# Altium footprint library MFG01.PcbLib: 21 footprints (part 2 of 2)
Each footprint in its own frame and in the unit in brackets; x right, y up, seen from the top. Pads: shape width x height; smd on the part's side, far side on the other; paste and mask are expansions set on the pad; w line width, h text height; cw(c..) or ccw(c..) is an arc to the next point about the centre after c.
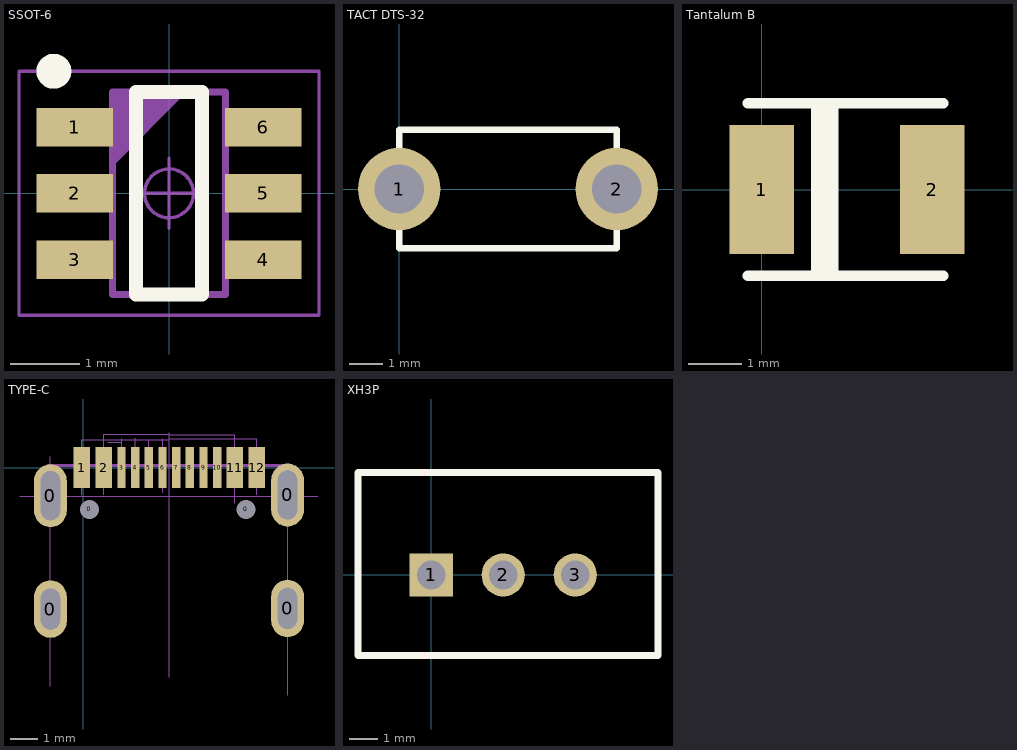
[diagram p1: the footprints below, top view; thin cyan lines are the x and y axes]

## SSOT-6 [mm] "SOT23, 0.95mm pitch; 6 pin, 1.625mm W X 2.90mm L X 1.00mm H body, IPC Medium Density"
height 1
pads (6):
  rect 1.1x0.55 smd: 1(-1.35,0.95) 2(-1.35,0) 3(-1.35,-0.95) 4(1.35,-0.95) 5(1.35,0) 6(1.35,0.95)
Top Overlay:
  circle w0.25: c-1.65,1.75 r0.125
  lines w0.2: -0.475,-1.45 -0.475,1.45 0.475,1.45 0.475,-1.45 -0.475,-1.45
Mechanical 14:
  lines w0.1: -0.812,0.45 0.188,1.45 ; -0.812,0.55 0.088,1.45 ; -0.812,0.65 -0.012,1.45 ; -0.812,0.75 -0.112,1.45 ; -0.812,0.85 -0.212,1.45 ; -0.812,0.95 -0.312,1.45 ; -0.812,1.05 -0.412,1.45 ; -0.812,1.15 -0.512,1.45 ; -0.812,1.25 -0.612,1.45 ; -0.812,1.35 -0.712,1.45 ; -0.812,-1.45 -0.812,1.45 0.812,1.45 0.812,-1.45 -0.812,-1.45
Mechanical 15:
  circle w0.05: c0,0 r0.35
  lines w0.05: -0.5,0 0.5,0 ; 0,-0.5 0,0.5 ; -2.15,-1.75 -2.15,1.75 2.15,1.75 2.15,-1.75 -2.15,-1.75
3D body "SOT95P280X100-6N.stp": height 1, standoff 0, extent -1.4,-1.5 1.4,1.5

## TACT DTS-32 [mm]
height 5
pads (2):
  round 2.5 hole 1.5: 1(0,0) 2(6.6,0)
Top Overlay:
  lines w0.2: 0,-1 0,-1.8 6.6,-1.8 6.6,-1 ; 0,1 0,1.8 6.6,1.8 6.6,1
3D body "User Library-DTS-32.STEP": height 5.5, standoff -3.01, extent -0.703,-1.75 7.053,1.75

## Tantalum B [mm]
height 1.2
pads (2):
  rect 1.2x2.4 smd: 1(0,0) 2(3.175,0)
Top Overlay:
  rectangle: 0.917,-1.6 1.425,1.625
  lines w0.2: -0.25,-1.599 3.375,-1.599 ; -0.25,1.605 3.375,1.605
3D body "User Library-CaseB_3528-21.STEP": height 1.9, standoff 0, extent -0.175,-1.425 3.325,1.375

## TYPE-C [mm] "TYPE-C"
height 3.9
pads (18):
  oval 1.2x2.1 hole 0.7 slot 1.5 at 90 deg: 0(-1.2,-5.175) 0(7.475,-5.15)
  oval 1.2x2.3 hole 0.7 slot 1.8 at 90 deg: 0(-1.2,-1.025) 0(7.475,-1)
  round 0.3 hole 0.7: 0(0.225,-1.525) 0(5.95,-1.525)
  rect 0.6x1.5 smd: 1(-0.05,0) 2(0.75,0) 11(5.55,0) 12(6.35,0)
  rect 0.3x1.5 smd: 3(1.4,0) 4(1.9,0) 5(2.4,0) 6(2.9,0) 7(3.4,0) 8(3.9,0) 9(4.4,0) 10(4.9,0)
Mechanical 8:
  lines w0.01: -2.325,-1.05 8.575,-1.05 ; -1.2,-8 -1.2,0.4 ; -0.05,-1 -0.05,1.025 3.15,1.025 ; 0.75,-1 0.75,1.225 3.15,1.225 ; 0.9,0.925 1.4,0.925 ; 1.4,0.75 1.4,1.05 ; 1.9,0.75 1.9,1.075 ; 2.4,0.675 2.4,1.025 ; 2.9,-0.925 2.9,1.05 ; 3.15,-7.675 3.15,1.275 ; 3.15,1.05 6.35,1.05 6.35,-1 ; 3.15,1.2 5.55,1.2 5.55,-1.3 ; 7.475,-8.325 7.475,0.075
  lines w0.1: -1.6,-1.35 -1.6,-0.65 ; -1.4,-5.675 -1.4,-4.975 ; -1.4,-1.35 -1.15,-1.35 ; -1.4,-1 -1.15,-1 ; -1.4,-0.65 -1.15,-0.65 ; -1.2,-5.675 -0.95,-5.675 -0.95,-5.925 ; -1.2,-5.325 -0.95,-5.325 ; -1.2,-4.975 -0.95,-4.975 -0.95,-4.725 ; -1.15,-1.6 -1.15,-1.35 ; -1.15,-1.25 -1.15,-1 ; -1.15,-0.75 -1.15,-1 ; -1.15,-0.4 -1.15,-0.65 ; -0.95,-5.575 -0.95,-5.325 ; -0.95,-5.075 -0.95,-5.325 ; -0.9,-1.35 -1.15,-1.35 ; -0.9,-1 -1.15,-1 ; -0.9,-0.65 -1.15,-0.65 ; 7.025,-5.75 7.275,-5.75 ; 7.025,-5.4 7.275,-5.4 ; 7.025,-5.05 7.275,-5.05 ; 7.075,-1.35 7.325,-1.35 ; 7.075,-1 7.325,-1 ; 7.075,-0.65 7.325,-0.65 ; 7.275,-6 7.275,-5.75 ; 7.275,-5.65 7.275,-5.4 ; 7.275,-5.15 7.275,-5.4 ; 7.275,-4.8 7.275,-5.05 ; 7.325,-1.6 7.325,-1.35 ; 7.325,-1.25 7.325,-1 ; 7.325,-0.75 7.325,-1 ; 7.325,-0.4 7.325,-0.65 ; 7.45,-0.975 7.475,-1 ; 7.525,-5.75 7.275,-5.75 ; 7.525,-5.4 7.275,-5.4 ; 7.525,-5.05 7.275,-5.05 ; 7.575,-1.35 7.325,-1.35 ; 7.575,-1 7.325,-1 ; 7.575,-0.65 7.325,-0.65 ; 7.725,-5.75 7.725,-5.05 ; 7.775,-1.35 7.775,-0.65
Mechanical 13:
  lines w0.1: -1.3,0.075 7.425,0.075
Mechanical 14:
  lines w0.1: -0.95,-1.405 ccw(c-1.125,-1.045) -0.725,-1.045 ; -0.95,-0.595 cw(c-1.125,-0.955) -0.725,-0.955 ; -0.7,-1.045 -0.7,-0.955 ; 7.475,-5.805 ccw(c7.3,-5.445) 7.7,-5.445 7.7,-5.355 ccw(c7.3,-5.355) 7.475,-4.995 ; 7.525,-1.405 ccw(c7.35,-1.045) 7.75,-1.045 7.75,-0.955 ccw(c7.35,-0.955) 7.525,-0.595
3D body "698b116-264-211 (3).stp": height 3.25, standoff -0.91, extent -1.655,-7.679 7.925,0.029

## XH3P [mm]
height 10
pads (3):
  rect 1.5x1.5 hole 1: 1(0,0)
  round 1.5 hole 1: 2(2.5,0) 3(5,0)
Top Overlay:
  lines w0.25: -2.54,-2.794 -2.54,3.556 7.874,3.556 7.874,-2.794 -2.54,-2.794
3D body "User Library-XH2_54-3P.STEP": height 7, standoff -1.8, extent -2.313,-2.498 7.647,3.302